# Altium footprint library li-ion-18650-capacity-meter.PcbLib: 23 footprints (part 2 of 2)
Each footprint in its own frame and in the unit in brackets; x right, y up, seen from the top. Pads: shape width x height; smd on the part's side, far side on the other; paste and mask are expansions set on the pad; w line width, h text height; cw(c..) or ccw(c..) is an arc to the next point about the centre after c.
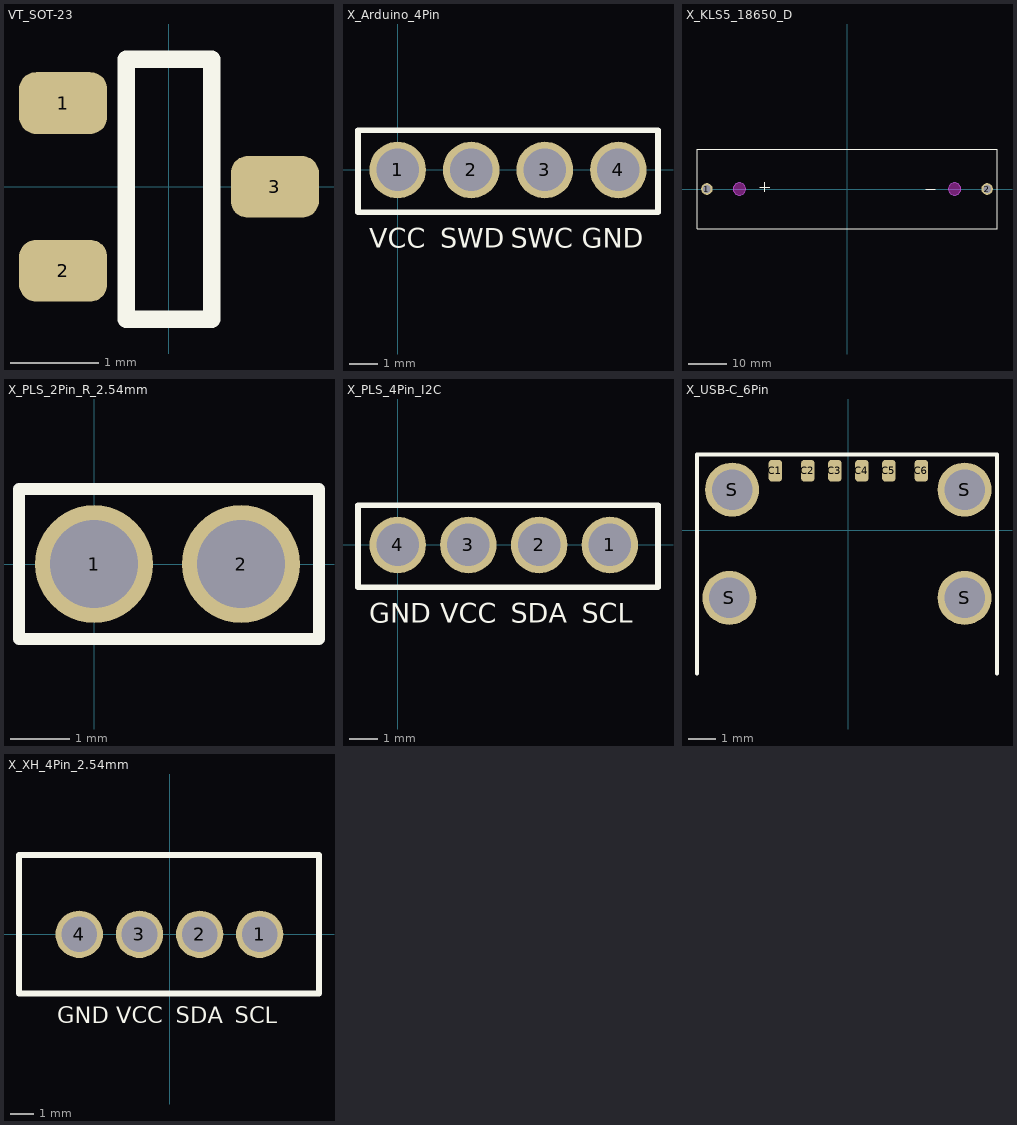
[diagram p1: the footprints below, top view; thin cyan lines are the x and y axes]

## VT_SOT-23 [mm] "Three-lead SOT-23 transistor footprint used for the IRLML2502 and IRLML6402 MOSFETs."
pads (3):
  rrect55% 1x0.7 smd: 1(-1.2,0.95) 2(-1.2,-0.95) 3(1.2,0)
Top Overlay:
  lines w0.2: -0.483,-1.499 0.483,-1.499 0.483,1.448 -0.483,1.448 -0.483,-1.499
  text "." at -2.134,1.497 h4.5
3D body "SOT23-3.STEP": height 1.29, standoff -0.01, extent -1.4,-1.45 1.4,1.45

## X_Arduino_4Pin [mm] "Four-position socket footprint assigned to the Connfly DS1021-1*4SF11-B SWD connector."
pads (4):
  round 2 hole 1.5: 1(0,0) 2(2.6,0) 3(5.2,0) 4(7.8,0)
Top Overlay:
  lines w0.2: -1.4,-1.5 9.2,-1.5 9.2,1.4 -1.4,1.4 -1.4,-1.5
  text "GND" at 6.504,-2.746 h0.7
  text "VCC" at -0.996,-2.746 h0.7
  text "SWC" at 4.004,-2.746 h0.7
  text "SWD" at 1.504,-2.746 h0.7
3D body "PLS-04.stp": height 8.2, standoff -3, extent -1.16,-1.298 9,1.2

## X_KLS5_18650_D [mm] "Battery-holder footprint for KLS KLS5-18650-D, one 18650 cell."
pads (2):
  round 3 hole 2: 1(-36.2,0) 2(36.2,0)
Top Overlay:
  lines w0.15: -22.5,0.5 -20,0.5 ; -21.25,-0.75 -21.25,1.75 ; 20.3,0 22.8,0 ; -38.75,-10.25 -38.75,10.25 38.75,10.25 38.75,-10.25 -38.75,-10.25
Keep-Out Layer:
  board cut-out: 27.8,1.6 27.958,1.6 28.267,1.539 28.558,1.418 28.82,1.243 29.043,1.02 29.218,0.758 29.339,0.467 29.4,0.158 29.4,0 29.4,-0.158 29.339,-0.467 29.218,-0.758 29.043,-1.02 28.82,-1.243 28.558,-1.418 28.267,-1.539 27.958,-1.6 27.8,-1.6 27.642,-1.6 27.333,-1.539 27.042,-1.418 26.78,-1.243 26.557,-1.02 26.382,-0.758 26.261,-0.467 26.2,-0.158 26.2,0 26.2,0.158 26.261,0.467 26.382,0.758 26.557,1.02 26.78,1.243 27.042,1.418 27.333,1.539 27.642,1.6
  board cut-out: -27.8,1.6 -27.642,1.6 -27.333,1.539 -27.042,1.418 -26.78,1.243 -26.557,1.02 -26.382,0.758 -26.261,0.467 -26.2,0.158 -26.2,0 -26.2,-0.158 -26.261,-0.467 -26.382,-0.758 -26.557,-1.02 -26.78,-1.243 -27.042,-1.418 -27.333,-1.539 -27.642,-1.6 -27.8,-1.6 -27.958,-1.6 -28.267,-1.539 -28.558,-1.418 -28.82,-1.243 -29.043,-1.02 -29.218,-0.758 -29.339,-0.467 -29.4,-0.158 -29.4,0 -29.4,0.158 -29.339,0.467 -29.218,0.758 -29.043,1.02 -28.82,1.243 -28.558,1.418 -28.267,1.539 -27.958,1.6
Mechanical 1:
  circle w0.254: c27.8,0 r1.6
  circle w0.254: c-27.8,0 r1.6
3D body "Porta_18650.STEP": height 21, standoff -4, extent -38.5,-10 38.5,10

## X_PLS_2Pin_R_2.54mm [mm] "Two-position PLS header footprint, 2.54 mm pitch per original library name."
pads (2):
  round 2 hole 1.5: 1(0,0) 2(2.5,0)
Top Overlay:
  lines w0.2: -1.275,-1.275 -1.275,1.275 3.825,1.275 3.825,-1.275 -1.275,-1.275
3D body "DS1022-1x7RUF11.stp": height 6.07, standoff -3, extent -1.247,-7.25 4,1.25

## X_PLS_4Pin_I2C [mm] "Four-position PLS header footprint for an I2C connection."
pads (4):
  round 2 hole 1.5: 1(7.5,0) 2(5,0) 3(2.5,0) 4(0,0)
Top Overlay:
  lines w0.2: -1.4,-1.5 -1.4,1.4 9.2,1.4 9.2,-1.5 -1.4,-1.5
  text "GND" at -0.996,-2.746 h0.7
  text "VCC" at 1.504,-2.746 h0.7
  text "SCL" at 6.504,-2.746 h0.7
  text "SDA" at 4.004,-2.746 h0.7
3D body "PLS-04.stp": height 8.2, standoff -3, extent -1.16,-1.298 9,1.2

## X_USB-C_6Pin [mm] "USB Type-C receptacle footprint used for the six-contact RUICHI 06PF-027 power connector."
pads (10):
  rrect50% 0.5x0.8 smd: C1(-2.7,2.2) C2(-1.5,2.2) C3(-0.5,2.2) C4(0.5,2.2) C5(1.5,2.2) C6(2.7,2.2)
  round 2 hole 1.5 unplated: S(-4.4,-2.5) S(-4.3,1.5) S(4.3,-2.5) S(4.3,1.5)
Top Overlay:
  lines w0.15: -5.6,-5.3 -5.6,2.8 5.5,2.8 5.5,-5.3
3D body "USB_type_C_smd_6p.stp": height 3.2, standoff -1.27, extent -4.6,-5.35 4.6,2.6

## X_XH_4Pin_2.54mm [mm] "Four-position XH header footprint assigned to JST B4B-XH-A(LF)(SN). Check pad pitch against the mating part."
pads (4):
  round 2 hole 1.5: 1(3.8,0) 2(1.27,0) 3(-1.27,0) 4(-3.81,0)
Top Overlay:
  lines w0.254: -6.35,-2.5 -6.35,3.35 6.299,3.35 6.299,-2.5 -6.35,-2.5
  text "." at 5.85,0.401 h4.5
  text "GND" at -4.746,-3.746 h0.7
  text "VCC" at -2.246,-3.746 h0.7
  text "SCL" at 2.754,-3.746 h0.7
  text "SDA" at 0.254,-3.746 h0.7
3D body "XH2.54-4P.STEP": height 7.03, standoff -2.47, extent -6.31,-2.4 6.31,3.3